# Altium footprint library PCB_V2.PcbLib: 86 footprints (part 6 of 6)
Each footprint in its own frame and in the unit in brackets; x right, y up, seen from the top. Pads: shape width x height; smd on the part's side, far side on the other; paste and mask are expansions set on the pad; w line width, h text height; cw(c..) or ccw(c..) is an arc to the next point about the centre after c.
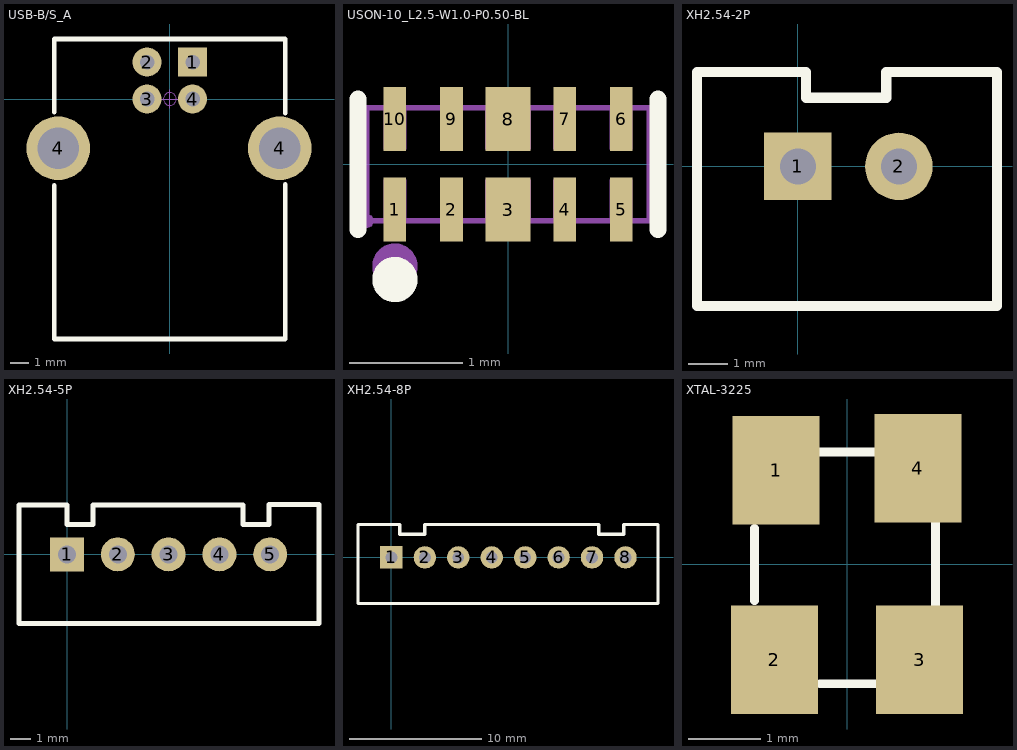
[diagram p5: the footprints below, top view; thin cyan lines are the x and y axes]

## USB-B/S_A [mm] "b型USB 母座 16."
height 1.1
pads (6):
  rect 1.6x1.6 hole 0.8: 1(1.25,2.032)
  round 1.6 hole 0.8: 2(-1.25,2.032) 3(-1.25,0) 4(1.25,0)
  round 3.5 hole 2.3: 4(-6.141,-2.71) 4(6.051,-2.71)
Top Overlay:
  lines w0.254: -6.35,-4.737 -6.35,-13.208 6.35,-13.208 6.35,-4.686 ; -6.35,-0.724 -6.35,3.302 6.35,3.302 6.35,-0.775
Mechanical 15:
  circle w0.05: c0,0 r0.35
  lines w0.05: -0.5,0 0.5,0 ; 0,-0.5 0,0.5
3D body: height 11.45, standoff -2.95, extent -6.86,-13.16 6.859,3.14

## USON-10_L2.5-W1.0-P0.50-BL [mm]
pads (10):
  rect 0.2x0.565 smd paste+0.051: 1(-1,-0.4) 2(-0.5,-0.4) 4(0.5,-0.4) 5(1,-0.4) 6(1,0.4) 7(0.5,0.4) 9(-0.5,0.4) 10(-1,0.4)
  rect 0.4x0.565 smd paste+0.051: 3(0,-0.4) 8(0,0.4)
Top Overlay:
  circle w0.2: c-1,-1.019 r0.1
  lines w0.152: -1.326,-0.576 -1.326,0.576 ; 1.326,-0.576 1.326,0.576
Mechanical 2:
  circle w0.2: c-1,-0.9 r0.1
Mechanical 6:
  lines w0.051: -1.25,-0.5 1.25,-0.5 1.25,0.5 -1.25,0.5 -1.25,-0.5
Mechanical 8:
  region: -1.185,-0.5 -1.204,-0.546 -1.25,-0.565 -1.296,-0.546 -1.315,-0.5 -1.296,-0.454 -1.25,-0.435 -1.204,-0.454
Mechanical 9:
  region: 0.9,0.5 1.1,0.5 1.1,0.135 0.9,0.135
  region: 0.4,0.5 0.6,0.5 0.6,0.135 0.4,0.135
  region: -0.6,0.5 -0.4,0.5 -0.4,0.135 -0.6,0.135
  region: -1.1,0.5 -0.9,0.5 -0.9,0.135 -1.1,0.135
  region: 0.9,-0.135 1.1,-0.135 1.1,-0.5 0.9,-0.5
  region: 0.4,-0.135 0.6,-0.135 0.6,-0.5 0.4,-0.5
  region: -0.6,-0.135 -0.4,-0.135 -0.4,-0.5 -0.6,-0.5
  region: -1.1,-0.135 -0.9,-0.135 -0.9,-0.5 -1.1,-0.5
  region: 0.2,0.5 0.2,0.135 -0.2,0.135 -0.2,0.5
  region: -0.2,-0.5 -0.2,-0.135 0.2,-0.135 0.2,-0.5

## XH2.54-2P [mm] "?"
pads (2):
  rect 1.7x1.7 hole 0.9: 1(0,0)
  round 1.7 hole 0.9: 2(2.54,0)
Top Overlay:
  lines w0.254: -2.537,-3.505 5.006,-3.505 5.006,2.37 4.224,2.37 2.223,2.37 2.223,1.727 0.203,1.727 0.203,2.37 -2.537,2.37 -2.537,-3.505
3D body: height 7.05, standoff -2.45, extent -2.5,-3.3 5.04,2.4

## XH2.54-5P [mm] "?"
pads (5):
  rect 1.7x1.7 hole 0.9: 1(0,0)
  round 1.7 hole 0.9: 2(2.54,0) 3(5.08,0) 4(7.62,0) 5(10.16,0)
Top Overlay:
  lines w0.254: 1.3,2.438 1.3,1.5 0,1.5 0,2.464 -2.4,2.464 -2.4,-3.454 12.6,-3.454 12.6,2.489 10.1,2.489 10.1,1.5 8.8,1.5 8.8,2.464 1.3,2.464
3D body: height 7.03, standoff -2.47, extent -2.5,-3.3 12.66,2.4

## XH2.54-8P [mm] "?"
pads (8):
  rect 1.7x1.7 hole 0.9: 1(0,0)
  round 1.7 hole 0.9: 2(2.54,0) 3(5.08,0) 4(7.62,0) 5(10.16,0) 6(12.7,0) 7(15.24,0) 8(17.78,0)
Top Overlay:
  lines w0.254: -2.54,-3.5 20.25,-3.5 20.25,2.5 17.653,2.5 17.653,1.75 15.748,1.75 15.748,2.5 2.54,2.5 2.54,1.75 0.635,1.75 0.635,2.5 -2.54,2.5 -2.54,-3.5
3D body: height 7.05, standoff -2.45, extent -2.5,-3.3 20.28,2.4

## XTAL-3225 [mm]
pads (4):
  rect 1.2x1.5 smd: 1(-0.978,1.295) 2(-1.003,-1.321) 3(1.003,-1.321) 4(0.978,1.321)
Top Overlay:
  lines w0.12: -1.278,-0.505 -1.278,0.495 ; -0.378,-1.655 0.422,-1.655 ; -0.378,1.545 0.422,1.545 ; 1.222,-0.605 1.222,0.595
3D body: height 0.8, standoff 0, extent -1.268,-1.651 1.232,1.549